# Altium footprint library MSP432diban.PcbLib: 1 footprints
Each footprint in its own frame and in the unit in brackets; x right, y up, seen from the top. Pads: shape width x height; smd on the part's side, far side on the other; paste and mask are expansions set on the pad; w line width, h text height; cw(c..) or ccw(c..) is an arc to the next point about the centre after c.
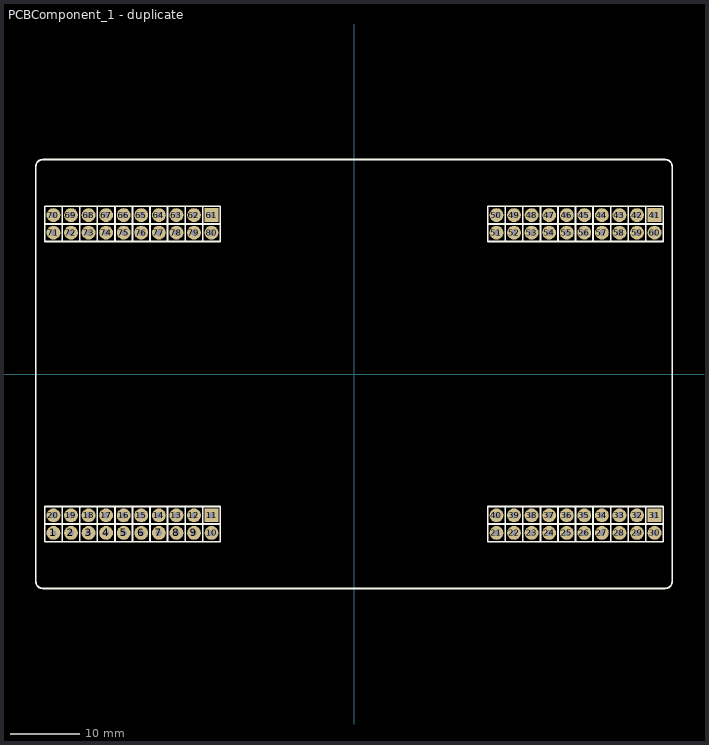
[diagram p0: the footprint, top view; thin cyan lines are the x and y axes]

## PCBComponent_1 - duplicate [mm]
pads (80):
  round 2 hole 0.9: 1(-43.455,-22.97) 2(-40.915,-22.97) 3(-38.375,-22.97) 4(-35.835,-22.97) 5(-33.295,-22.97) 6(-30.755,-22.97) 7(-28.215,-22.97) 8(-25.675,-22.97) 9(-23.135,-22.97) 10(-20.595,-22.97) 12(-23.135,-20.43) 13(-25.675,-20.43) 14(-28.215,-20.43) 15(-30.755,-20.43) 16(-33.295,-20.43) 17(-35.835,-20.43) 18(-38.375,-20.43) 19(-40.915,-20.43) 20(-43.455,-20.43) 21(20.595,-22.97) 22(23.135,-22.97) 23(25.675,-22.97) 24(28.215,-22.97) 25(30.755,-22.97) 26(33.295,-22.97) 27(35.835,-22.97) 28(38.375,-22.97) 29(40.915,-22.97) 30(43.455,-22.97) 32(40.915,-20.43) 33(38.375,-20.43) 34(35.835,-20.43) 35(33.295,-20.43) 36(30.755,-20.43) 37(28.215,-20.43) 38(25.675,-20.43) 39(23.135,-20.43) 40(20.595,-20.43) 42(40.915,22.97) 43(38.375,22.97) 44(35.835,22.97) 45(33.295,22.97) 46(30.755,22.97) 47(28.215,22.97) 48(25.675,22.97) 49(23.135,22.97) 50(20.595,22.97) 51(20.595,20.43) 52(23.135,20.43) 53(25.675,20.43) 54(28.215,20.43) 55(30.755,20.43) 56(33.295,20.43) 57(35.835,20.43) 58(38.375,20.43) 59(40.915,20.43) 60(43.455,20.43) 62(-23.135,22.97) 63(-25.675,22.97) 64(-28.215,22.97) 65(-30.755,22.97) 66(-33.295,22.97) 67(-35.835,22.97) 68(-38.375,22.97) 69(-40.915,22.97) 70(-43.455,22.97) 71(-43.455,20.43) 72(-40.915,20.43) 73(-38.375,20.43) 74(-35.835,20.43) 75(-33.295,20.43) 76(-30.755,20.43) 77(-28.215,20.43) 78(-25.675,20.43) 79(-23.135,20.43) 80(-20.595,20.43)
  rect 2x2 hole 0.9: 11(-20.595,-20.43) 31(43.455,-20.43) 41(43.455,22.97) 61(-20.595,22.97)
Top Overlay:
  lines w0.254: -44.725,-21.7 -19.325,-21.7 ; -44.725,21.7 -19.325,21.7 ; -42.185,-24.24 -42.185,-19.16 ; -42.185,19.16 -42.185,24.24 ; -39.645,-24.24 -39.645,-19.16 ; -39.645,19.16 -39.645,24.24 ; -37.105,-24.24 -37.105,-19.16 ; -37.105,19.16 -37.105,24.24 ; -34.565,-24.24 -34.565,-19.16 ; -34.565,19.16 -34.565,24.24 ; -32.025,-24.24 -32.025,-19.16 ; -32.025,19.16 -32.025,24.24 ; -29.485,-24.24 -29.485,-19.16 ; -29.485,19.16 -29.485,24.24 ; -26.945,-24.24 -26.945,-19.16 ; -26.945,19.16 -26.945,24.24 ; -24.405,-24.24 -24.405,-19.16 ; -24.405,19.16 -24.405,24.24 ; -21.865,-24.24 -21.865,-19.16 ; -21.865,19.16 -21.865,24.24 ; 19.325,-21.7 44.725,-21.7 ; 19.325,21.7 44.725,21.7 ; 21.865,-24.24 21.865,-19.16 ; 21.865,19.16 21.865,24.24 ; 24.405,-24.24 24.405,-19.16 ; 24.405,19.16 24.405,24.24 ; 26.945,-24.24 26.945,-19.16 ; 26.945,19.16 26.945,24.24 ; 29.485,-24.24 29.485,-19.16 ; 29.485,19.16 29.485,24.24 ; 32.025,-24.24 32.025,-19.16 ; 32.025,19.16 32.025,24.24 ; 34.565,-24.24 34.565,-19.16 ; 34.565,19.16 34.565,24.24 ; 37.105,-24.24 37.105,-19.16 ; 37.105,19.16 37.105,24.24 ; 39.645,-24.24 39.645,-19.16 ; 39.645,19.16 39.645,24.24 ; 42.185,-24.24 42.185,-19.16 ; 42.185,19.16 42.185,24.24 ; -44.725,-24.24 -44.725,-19.16 ; -44.725,-24.24 -44.725,-19.16 ; -44.725,-24.24 -19.325,-24.24 -19.325,-19.16 -44.725,-19.16 ; -44.725,19.16 -44.725,24.24 ; -44.725,19.16 -44.725,24.24 ; -44.725,19.16 -19.325,19.16 -19.325,24.24 -44.725,24.24 ; 19.325,-24.24 19.325,-19.16 ; 19.325,-24.24 19.325,-19.16 ; 19.325,-24.24 44.725,-24.24 44.725,-19.16 19.325,-19.16 ; 19.325,19.16 19.325,24.24 ; 19.325,19.16 19.325,24.24 ; 19.325,19.16 44.725,19.16 44.725,24.24 19.325,24.24 ; -46,-30 ccw(c-45,-30) -45,-31 45,-31 ccw(c45,-30) 46,-30 46,30 ccw(c45,30) 45,31 -45,31 ccw(c-45,30) -46,30 -46,-30
3D body "HDR2.54-1x2P.STEP": height 8.5, standoff -3, extent -39.645,-24.24 -37.105,-19.16
3D body "HDR2.54-1x2P.STEP": height 8.5, standoff -3, extent -42.185,-24.24 -39.645,-19.16
3D body "HDR2.54-1x2P.STEP": height 8.5, standoff -3, extent -34.565,-24.24 -32.025,-19.16
3D body "HDR2.54-1x2P.STEP": height 8.5, standoff -3, extent -37.105,-24.24 -34.565,-19.16
3D body "HDR2.54-1x2P.STEP": height 8.5, standoff -3, extent -44.725,-24.24 -42.185,-19.16
3D body "HDR2.54-1x2P.STEP": height 8.5, standoff -3, extent -26.945,-24.24 -24.405,-19.16
3D body "HDR2.54-1x2P.STEP": height 8.5, standoff -3, extent -29.485,-24.24 -26.945,-19.16
3D body "HDR2.54-1x2P.STEP": height 8.5, standoff -3, extent -21.865,-24.24 -19.325,-19.16
3D body "HDR2.54-1x2P.STEP": height 8.5, standoff -3, extent -24.405,-24.24 -21.865,-19.16
3D body "HDR2.54-1x2P.STEP": height 8.5, standoff -3, extent -32.025,-24.24 -29.485,-19.16
3D body "HDR2.54-1x2P.STEP": height 8.5, standoff -3, extent -39.645,19.16 -37.105,24.24
3D body "HDR2.54-1x2P.STEP": height 8.5, standoff -3, extent -42.185,19.16 -39.645,24.24
3D body "HDR2.54-1x2P.STEP": height 8.5, standoff -3, extent -34.565,19.16 -32.025,24.24
3D body "HDR2.54-1x2P.STEP": height 8.5, standoff -3, extent -37.105,19.16 -34.565,24.24
3D body "HDR2.54-1x2P.STEP": height 8.5, standoff -3, extent -44.725,19.16 -42.185,24.24
3D body "HDR2.54-1x2P.STEP": height 8.5, standoff -3, extent -26.945,19.16 -24.405,24.24
3D body "HDR2.54-1x2P.STEP": height 8.5, standoff -3, extent -29.485,19.16 -26.945,24.24
3D body "HDR2.54-1x2P.STEP": height 8.5, standoff -3, extent -21.865,19.16 -19.325,24.24
3D body "HDR2.54-1x2P.STEP": height 8.5, standoff -3, extent -24.405,19.16 -21.865,24.24
3D body "HDR2.54-1x2P.STEP": height 8.5, standoff -3, extent -32.025,19.16 -29.485,24.24
3D body "HDR2.54-1x2P.STEP": height 8.5, standoff -3, extent 24.405,19.16 26.945,24.24
3D body "HDR2.54-1x2P.STEP": height 8.5, standoff -3, extent 21.865,19.16 24.405,24.24
3D body "HDR2.54-1x2P.STEP": height 8.5, standoff -3, extent 29.485,19.16 32.025,24.24
3D body "HDR2.54-1x2P.STEP": height 8.5, standoff -3, extent 26.945,19.16 29.485,24.24
3D body "HDR2.54-1x2P.STEP": height 8.5, standoff -3, extent 19.325,19.16 21.865,24.24
3D body "HDR2.54-1x2P.STEP": height 8.5, standoff -3, extent 37.105,19.16 39.645,24.24
3D body "HDR2.54-1x2P.STEP": height 8.5, standoff -3, extent 34.565,19.16 37.105,24.24
3D body "HDR2.54-1x2P.STEP": height 8.5, standoff -3, extent 42.185,19.16 44.725,24.24
3D body "HDR2.54-1x2P.STEP": height 8.5, standoff -3, extent 39.645,19.16 42.185,24.24
3D body "HDR2.54-1x2P.STEP": height 8.5, standoff -3, extent 32.025,19.16 34.565,24.24
3D body "HDR2.54-1x2P.STEP": height 8.5, standoff -3, extent 24.405,-24.24 26.945,-19.16
3D body "HDR2.54-1x2P.STEP": height 8.5, standoff -3, extent 21.865,-24.24 24.405,-19.16
3D body "HDR2.54-1x2P.STEP": height 8.5, standoff -3, extent 29.485,-24.24 32.025,-19.16
3D body "HDR2.54-1x2P.STEP": height 8.5, standoff -3, extent 26.945,-24.24 29.485,-19.16
3D body "HDR2.54-1x2P.STEP": height 8.5, standoff -3, extent 19.325,-24.24 21.865,-19.16
3D body "HDR2.54-1x2P.STEP": height 8.5, standoff -3, extent 37.105,-24.24 39.645,-19.16
3D body "HDR2.54-1x2P.STEP": height 8.5, standoff -3, extent 34.565,-24.24 37.105,-19.16
3D body "HDR2.54-1x2P.STEP": height 8.5, standoff -3, extent 42.185,-24.24 44.725,-19.16
3D body "HDR2.54-1x2P.STEP": height 8.5, standoff -3, extent 39.645,-24.24 42.185,-19.16
3D body "HDR2.54-1x2P.STEP": height 8.5, standoff -3, extent 32.025,-24.24 34.565,-19.16